# Altium footprint library Brian_.PcbLib: 66 footprints (part 5 of 5)
Each footprint in its own frame and in the unit in brackets; x right, y up, seen from the top. Pads: shape width x height; smd on the part's side, far side on the other; paste and mask are expansions set on the pad; w line width, h text height; cw(c..) or ccw(c..) is an arc to the next point about the centre after c.
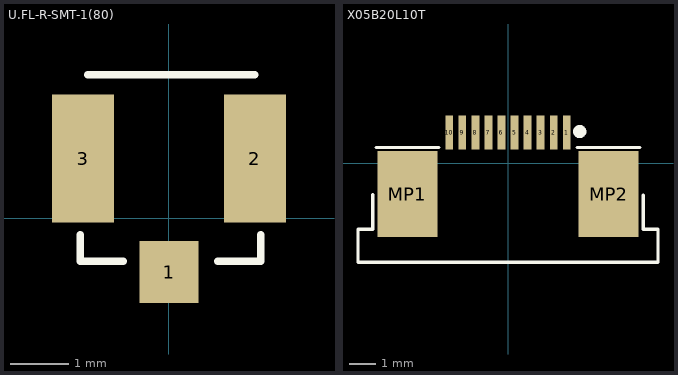
[diagram p4: the footprints below, top view; thin cyan lines are the x and y axes]

## U.FL-R-SMT-1(80) [mm]
pads (3):
  rect 1.02x1.07 smd: 1(0,-0.923)
  rect 1.07x2.2 smd: 2(1.475,1.025) 3(-1.475,1.025)
Top Overlay:
  lines w0.127: -1.524,-0.279 -1.524,-0.737 -0.787,-0.737 ; -1.397,2.464 1.473,2.464 ; 0.838,-0.737 1.575,-0.737 1.575,-0.279
3D body "U.FL-R-SMT-1.stp": height 1.2, standoff -0.05, extent -1.475,-0.686 1.525,2.414

## X05B20L10T [mm] "Bottom Contact 10 0.020\"(0.50mm) 0.079\"(2.00mm) Slide Lock SMD,P=0.5mm FFC, FPC Connectors RoHS"
pads (12):
  rect 0.3x1.3 smd: 1(2.25,1.175) 2(1.75,1.175) 3(1.25,1.175) 4(0.75,1.175) 5(0.25,1.175) 6(-0.25,1.175) 7(-0.75,1.175) 8(-1.25,1.175) 9(-1.75,1.175) 10(-2.25,1.175)
  rect 2.3x3.3 smd: MP1(-3.85,-1.175) MP2(3.85,-1.175)
Top Overlay:
  circle w0.254: c2.743,1.219 r0.127
  lines w0.127: -5.182,-1.194 -5.182,-2.515 -5.74,-2.515 -5.74,-3.785 5.74,-3.785 5.74,-2.515 5.182,-2.515 5.182,-1.219 ; -5.055,0.61 -2.642,0.61 ; 2.642,0.61 5.055,0.61
3D body "68711014522_Download_STP_68711014522_rev1.stp": height 2.05, standoff -0.05, extent -5.7,-3.791 5.7,1.309